# Altium schematic symbol library SMBJ15A.SchLib: 1 symbol
Pins are listed as number, name and electrical type; pins without a type are passive.

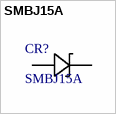
[diagram p0: symbol SMBJ15A]

## SMBJ15A
designator CR?
Description; Manufacturer_Name: Littelfuse Inc; Copyright: Copyright (C) 2025 Ultra Librarian. All rights reserved.; Manufacturer_Part_Number: SMBJ15A
footprint DO-214AASMB_J-BEND_LTF
pins: 1, 2